# Altium footprint library HFPB_01-PCBLib.PcbLib: 102 footprints (part 3 of 7)
Each footprint in its own frame and in the unit in brackets; x right, y up, seen from the top. Pads: shape width x height; smd on the part's side, far side on the other; paste and mask are expansions set on the pad; w line width, h text height; cw(c..) or ccw(c..) is an arc to the next point about the centre after c.
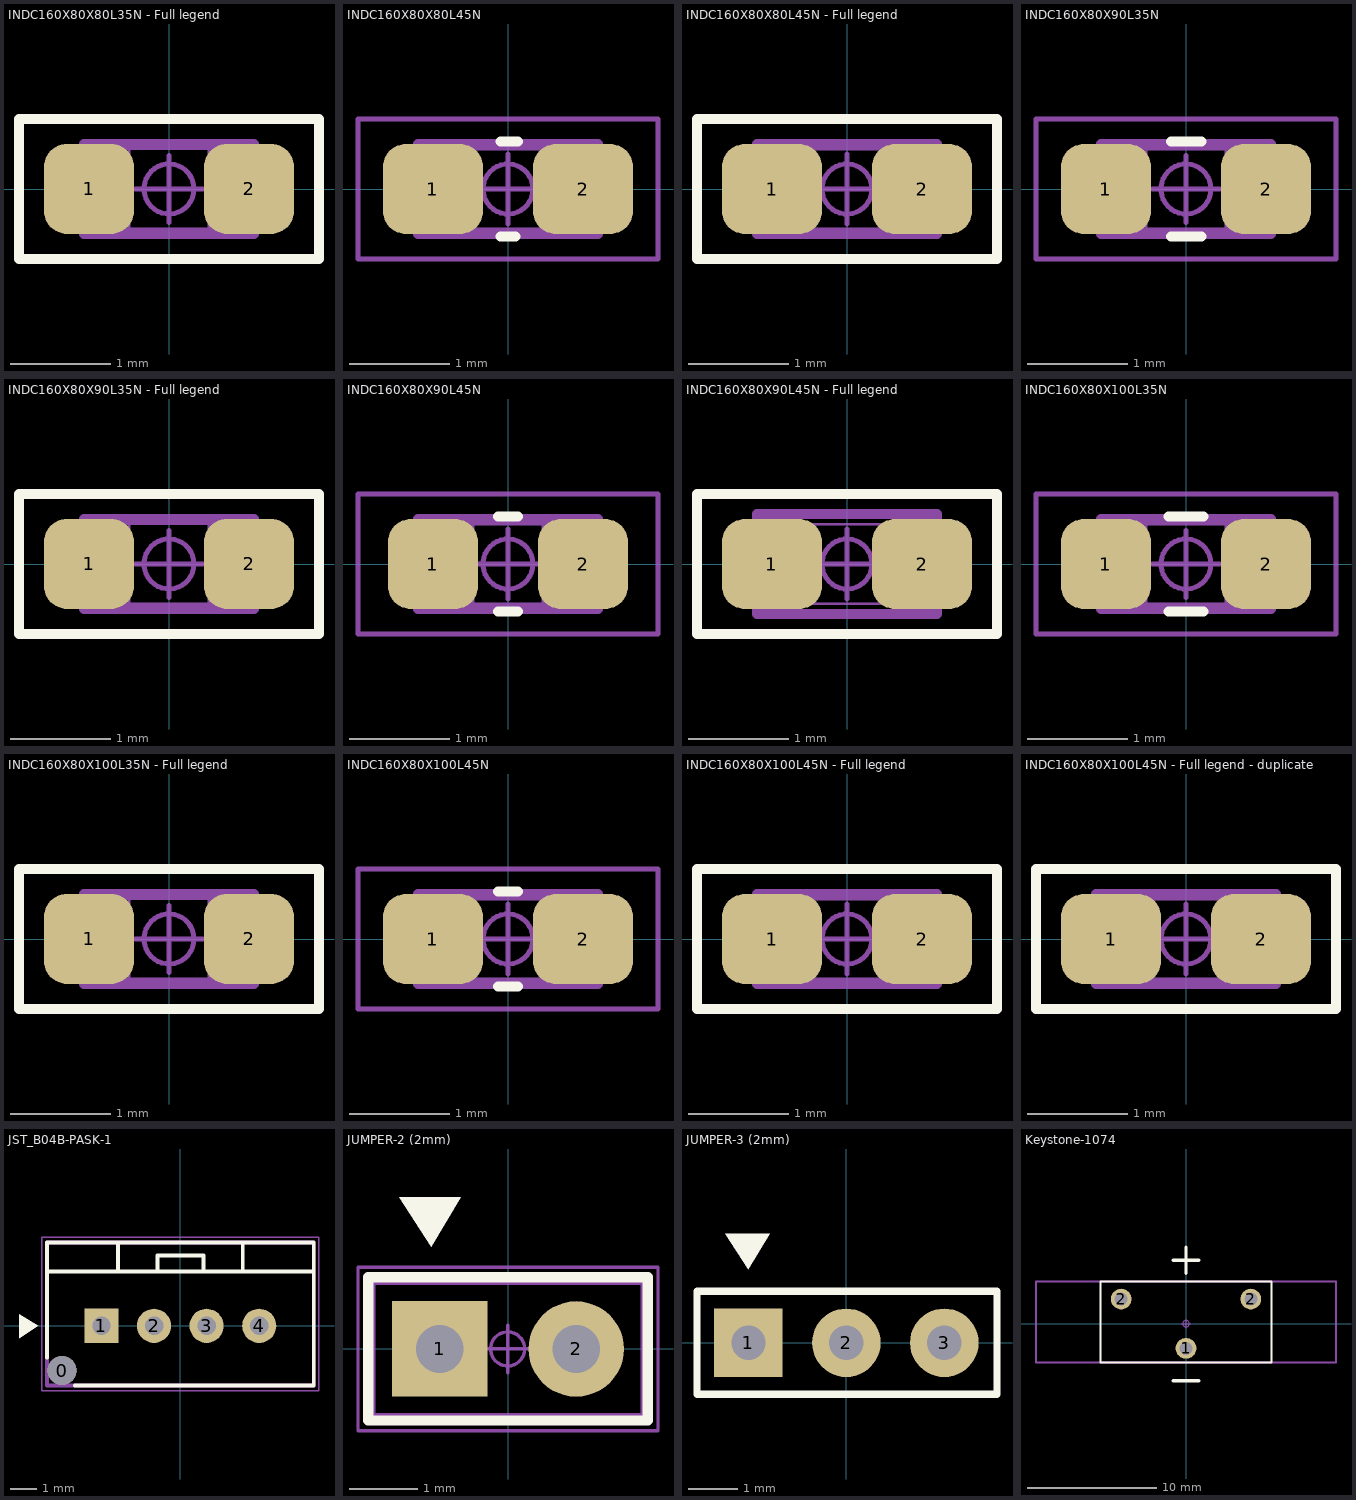
[diagram p2: the footprints below, top view; thin cyan lines are the x and y axes]

## INDC160X80X80L35N - Full legend [mm] "Inductor, Chip; 1.60 mm L X 0.80 mm W X 0.80 mm H body"
height 0.8
pads (2):
  rrect51% 0.9x0.9 smd: 1(-0.8,0.001) 2(0.8,0.001)
Top Overlay:
  lines w0.1: -1.5,-0.7 -1.5,0.7 1.5,0.7 1.5,-0.7 -1.5,-0.7
Mechanical 11:
  lines w0.1: -0.85,-0.449 0.85,-0.449 0.85,0.451 -0.85,0.451 -0.85,-0.449
Mechanical 12:
  lines w0.025: -0.8,-0.399 0.8,-0.399 ; -0.8,-0.399 -0.8,0.401 ; -0.8,-0.399 -0.8,0.401 ; -0.8,-0.399 -0.4,-0.399 -0.4,0.401 -0.8,0.401 ; -0.8,0.401 0.8,0.401 ; 0.8,-0.399 0.8,0.401 ; 0.8,-0.399 0.4,-0.399 0.4,0.401 0.8,0.401 ; 0.8,-0.399 0.8,0.401
Mechanical 15:
  circle w0.05: c0,0.001 r0.25
  lines w0.05: -0.335,0.001 0.335,0.001 ; 0,-0.334 0,0.336 ; -1.5,-0.699 1.5,-0.699 1.5,0.701 -1.5,0.701 -1.5,-0.699
Mechanical 16:
  text ".Designator" at -1.5,0.9 h1.2
3D body "INDC160X80X80L35.STEP": height 0.8, standoff 0, extent -0.8,-0.4 0.8,0.4

## INDC160X80X80L45N [mm] "Inductor, Chip; 1.60 mm L X 0.80 mm W X 0.80 mm H body"
height 0.8
pads (2):
  rrect51% 1x0.9 smd: 1(-0.75,0) 2(0.75,0)
Top Overlay:
  lines w0.1: -0.075,-0.475 0.075,-0.475 ; -0.075,0.475 0.1,0.475
Mechanical 11:
  lines w0.1: -0.9,-0.45 -0.9,0.45 0.9,0.45 0.9,-0.45 -0.9,-0.45
Mechanical 12:
  lines w0.025: -0.8,-0.4 -0.35,-0.4 -0.35,0.4 -0.8,0.4 ; -0.8,-0.4 -0.8,0.4 ; -0.8,-0.4 -0.8,0.4 ; -0.8,-0.4 0.8,-0.4 ; -0.8,0.4 0.8,0.4 ; 0.8,-0.4 0.8,0.4 ; 0.8,-0.4 0.35,-0.4 0.35,0.4 0.8,0.4 ; 0.8,-0.4 0.8,0.4
Mechanical 15:
  circle w0.05: c0,0 r0.25
  lines w0.05: -0.35,0 0.35,0 ; 0,-0.35 0,0.35 ; -1.5,-0.7 -1.5,0.7 1.5,0.7 1.5,-0.7 -1.5,-0.7
Mechanical 16:
  text ".Designator" at -1.5,1.025 h1.2
3D body "INDC160X80X80L45.STEP": height 0.8, standoff 0, extent -0.8,-0.4 0.8,0.4

## INDC160X80X80L45N - Full legend [mm] "Inductor, Chip; 1.60 mm L X 0.80 mm W X 0.80 mm H body"
height 0.8
pads (2):
  rrect51% 1x0.9 smd: 1(-0.75,0) 2(0.75,0)
Top Overlay:
  lines w0.1: -1.5,-0.7 -1.5,0.7 1.5,0.7 1.5,-0.7 -1.5,-0.7
Mechanical 11:
  lines w0.1: -0.9,-0.45 -0.9,0.45 0.9,0.45 0.9,-0.45 -0.9,-0.45
Mechanical 12:
  lines w0.025: -0.8,-0.4 -0.35,-0.4 -0.35,0.4 -0.8,0.4 ; -0.8,-0.4 -0.8,0.4 ; -0.8,-0.4 -0.8,0.4 ; -0.8,-0.4 0.8,-0.4 ; -0.8,0.4 0.8,0.4 ; 0.8,-0.4 0.8,0.4 ; 0.8,-0.4 0.35,-0.4 0.35,0.4 0.8,0.4 ; 0.8,-0.4 0.8,0.4
Mechanical 15:
  circle w0.05: c0,0 r0.25
  lines w0.05: -0.35,0 0.35,0 ; 0,-0.35 0,0.35 ; -1.5,-0.7 -1.5,0.7 1.5,0.7 1.5,-0.7 -1.5,-0.7
Mechanical 16:
  text ".Designator" at 0,0 h1.2
3D body "INDC160X80X80L45.STEP": height 0.8, standoff 0, extent -0.8,-0.4 0.8,0.4

## INDC160X80X90L35N [mm] "Inductor, Chip; 1.60 mm L X 0.80 mm W X 0.90 mm H body"
height 0.9
pads (2):
  rrect51% 0.9x0.9 smd: 1(-0.8,0.001) 2(0.8,0.001)
Top Overlay:
  lines w0.1: -0.15,-0.475 0.155,-0.475 ; -0.15,0.475 0.155,0.475
Mechanical 11:
  lines w0.1: -0.85,-0.449 -0.85,0.451 0.85,0.451 0.85,-0.449 -0.85,-0.449
Mechanical 12:
  lines w0.025: -0.8,-0.399 -0.4,-0.399 -0.4,0.401 -0.8,0.401 ; -0.8,-0.399 -0.8,0.401 ; -0.8,-0.399 -0.8,0.401 ; -0.8,-0.399 0.8,-0.399 ; -0.8,0.401 0.8,0.401 ; 0.8,-0.399 0.8,0.401 ; 0.8,-0.399 0.4,-0.399 0.4,0.401 0.8,0.401 ; 0.8,-0.399 0.8,0.401
Mechanical 15:
  circle w0.05: c0,0.001 r0.25
  lines w0.05: -0.335,0.001 0.335,0.001 ; 0,-0.334 0,0.336 ; -1.5,-0.699 -1.5,0.701 1.5,0.701 1.5,-0.699 -1.5,-0.699
Mechanical 16:
  text ".Designator" at -1.5,0.9 h1.2
3D body "INDC160X80X90L35.STEP": height 0.9, standoff 0, extent -0.8,-0.4 0.8,0.4

## INDC160X80X90L35N - Full legend [mm] "Inductor, Chip; 1.60 mm L X 0.80 mm W X 0.90 mm H body"
height 0.9
pads (2):
  rrect51% 0.9x0.9 smd: 1(-0.8,0.001) 2(0.8,0.001)
Top Overlay:
  lines w0.1: -1.5,-0.7 1.5,-0.7 1.5,0.7 -1.5,0.7 -1.5,-0.7
Mechanical 11:
  lines w0.1: -0.85,-0.449 -0.85,0.451 0.85,0.451 0.85,-0.449 -0.85,-0.449
Mechanical 12:
  lines w0.025: -0.8,-0.399 -0.4,-0.399 -0.4,0.401 -0.8,0.401 ; -0.8,-0.399 -0.8,0.401 ; -0.8,-0.399 -0.8,0.401 ; -0.8,-0.399 0.8,-0.399 ; -0.8,0.401 0.8,0.401 ; 0.8,-0.399 0.8,0.401 ; 0.8,-0.399 0.4,-0.399 0.4,0.401 0.8,0.401 ; 0.8,-0.399 0.8,0.401
Mechanical 15:
  circle w0.05: c0,0.001 r0.25
  lines w0.05: -0.335,0.001 0.335,0.001 ; 0,-0.334 0,0.336 ; -1.5,-0.699 -1.5,0.701 1.5,0.701 1.5,-0.699 -1.5,-0.699
Mechanical 16:
  text ".Designator" at -1.5,0.9 h1.2
3D body "INDC160X80X90L35.STEP": height 0.9, standoff 0, extent -0.8,-0.4 0.8,0.4

## INDC160X80X90L45N [mm] "Inductor, Chip; 1.60 mm L X 0.80 mm W X 0.90 mm H body"
height 0.9
pads (2):
  rrect51% 0.9x0.9 smd: 1(-0.75,0) 2(0.75,0)
Top Overlay:
  lines w0.1: -0.1,-0.475 0.1,-0.475 ; -0.1,0.475 0.1,0.475
Mechanical 11:
  lines w0.1: -0.9,-0.45 -0.9,0.45 0.9,0.45 0.9,-0.45 -0.9,-0.45
Mechanical 12:
  lines w0.025: -0.8,-0.4 -0.35,-0.4 -0.35,0.4 -0.8,0.4 ; -0.8,-0.4 -0.8,0.4 ; -0.8,-0.4 -0.8,0.4 ; -0.8,-0.4 0.8,-0.4 ; -0.8,0.4 0.8,0.4 ; 0.8,-0.4 0.8,0.4 ; 0.8,-0.4 0.35,-0.4 0.35,0.4 0.8,0.4 ; 0.8,-0.4 0.8,0.4
Mechanical 15:
  circle w0.05: c0,0 r0.25
  lines w0.05: -0.35,0 0.35,0 ; 0,-0.35 0,0.35 ; -1.5,-0.7 -1.5,0.7 1.5,0.7 1.5,-0.7 -1.5,-0.7
Mechanical 16:
  text ".Designator" at -1.1,1 h1.2
3D body "INDC160X80X90L45.STEP": height 0.9, standoff 0, extent -0.8,-0.4 0.8,0.4

## INDC160X80X90L45N - Full legend [mm] "Inductor, Chip; 1.60 mm L X 0.80 mm W X 0.90 mm H body"
height 0.9
pads (2):
  rrect51% 1x0.9 smd: 1(-0.75,0) 2(0.75,0)
Top Overlay:
  lines w0.1: -1.5,-0.7 1.5,-0.7 1.5,0.7 -1.5,0.7 -1.5,-0.7
Mechanical 11:
  lines w0.1: -0.9,-0.5 0.9,-0.5 0.9,0.5 -0.9,0.5 -0.9,-0.5
Mechanical 12:
  lines w0.025: -0.8,-0.4 0.8,-0.4 ; -0.8,-0.4 -0.8,0.4 ; -0.8,-0.4 -0.8,0.4 ; -0.8,-0.4 -0.35,-0.4 -0.35,0.4 -0.8,0.4 ; -0.8,0.4 0.8,0.4 ; 0.8,-0.4 0.8,0.4 ; 0.8,-0.4 0.35,-0.4 0.35,0.4 0.8,0.4 ; 0.8,-0.4 0.8,0.4
Mechanical 15:
  circle w0.05: c0,0 r0.25
  lines w0.05: -0.35,0 0.35,0 ; 0,-0.35 0,0.35 ; -1.5,-0.7 1.5,-0.7 1.5,0.7 -1.5,0.7 -1.5,-0.7
Mechanical 16:
  text ".Designator" at 0,0 h1.2
3D body "INDC160X80X90L45.STEP": height 0.9, standoff 0, extent -0.8,-0.4 0.8,0.4

## INDC160X80X100L35N [mm] "Inductor, Chip; 1.60 mm L X 0.80 mm W X 1.00 mm H body"
height 1
pads (2):
  rrect51% 0.9x0.9 smd: 1(-0.8,0.001) 2(0.8,0.001)
Top Overlay:
  lines w0.1: -0.175,-0.475 0.175,-0.475 ; -0.175,0.475 0.175,0.475
Mechanical 11:
  lines w0.1: -0.85,-0.449 0.85,-0.449 0.85,0.451 -0.85,0.451 -0.85,-0.449
Mechanical 12:
  lines w0.025: -0.8,-0.399 0.8,-0.399 ; -0.8,-0.399 -0.8,0.401 ; -0.8,-0.399 -0.8,0.401 ; -0.8,-0.399 -0.4,-0.399 -0.4,0.401 -0.8,0.401 ; -0.8,0.401 0.8,0.401 ; 0.8,-0.399 0.8,0.401 ; 0.8,-0.399 0.4,-0.399 0.4,0.401 0.8,0.401 ; 0.8,-0.399 0.8,0.401
Mechanical 15:
  circle w0.05: c0,0.001 r0.25
  lines w0.05: -0.335,0.001 0.335,0.001 ; 0,-0.334 0,0.336 ; -1.5,-0.699 1.5,-0.699 1.5,0.701 -1.5,0.701 -1.5,-0.699
Mechanical 16:
  text ".Designator" at -1.5,0.9 h1.2
3D body "INDC160X80X100L35.STEP": height 1, standoff 0, extent -0.8,-0.4 0.8,0.4

## INDC160X80X100L35N - Full legend [mm] "Inductor, Chip; 1.60 mm L X 0.80 mm W X 1.00 mm H body"
height 1
pads (2):
  rrect51% 0.9x0.9 smd: 1(-0.8,0.001) 2(0.8,0.001)
Top Overlay:
  lines w0.1: -1.5,-0.7 -1.5,0.7 1.5,0.7 1.5,-0.7 -1.5,-0.7
Mechanical 11:
  lines w0.1: -0.85,-0.449 0.85,-0.449 0.85,0.451 -0.85,0.451 -0.85,-0.449
Mechanical 12:
  lines w0.025: -0.8,-0.399 0.8,-0.399 ; -0.8,-0.399 -0.8,0.401 ; -0.8,-0.399 -0.8,0.401 ; -0.8,-0.399 -0.4,-0.399 -0.4,0.401 -0.8,0.401 ; -0.8,0.401 0.8,0.401 ; 0.8,-0.399 0.8,0.401 ; 0.8,-0.399 0.4,-0.399 0.4,0.401 0.8,0.401 ; 0.8,-0.399 0.8,0.401
Mechanical 15:
  circle w0.05: c0,0.001 r0.25
  lines w0.05: -0.335,0.001 0.335,0.001 ; 0,-0.334 0,0.336 ; -1.5,-0.699 1.5,-0.699 1.5,0.701 -1.5,0.701 -1.5,-0.699
Mechanical 16:
  text ".Designator" at -1.5,0.9 h1.2
3D body "INDC160X80X100L35.STEP": height 1, standoff 0, extent -0.8,-0.4 0.8,0.4

## INDC160X80X100L45N [mm] "Inductor, Chip; 1.60 mm L X 0.80 mm W X 1.0 mm H body"
height 1
pads (2):
  rrect51% 1x0.9 smd: 1(-0.75,0) 2(0.75,0)
Top Overlay:
  lines w0.1: -0.1,-0.475 0.1,-0.475 ; -0.1,0.475 0.1,0.475
Mechanical 11:
  lines w0.1: -0.9,-0.45 0.9,-0.45 0.9,0.45 -0.9,0.45 -0.9,-0.45
Mechanical 12:
  lines w0.025: -0.8,-0.4 0.8,-0.4 ; -0.8,-0.4 -0.8,0.4 ; -0.8,-0.4 -0.8,0.4 ; -0.8,-0.4 -0.35,-0.4 -0.35,0.4 -0.8,0.4 ; -0.8,0.4 0.8,0.4 ; 0.8,-0.4 0.8,0.4 ; 0.8,-0.4 0.35,-0.4 0.35,0.4 0.8,0.4 ; 0.8,-0.4 0.8,0.4
Mechanical 15:
  circle w0.05: c0,0 r0.25
  lines w0.05: -0.35,0 0.35,0 ; 0,-0.35 0,0.35 ; -1.5,-0.7 1.5,-0.7 1.5,0.7 -1.5,0.7 -1.5,-0.7
Mechanical 16:
  text ".Designator" at 0,0 h1.2
3D body "INDC160X80X100L45.STEP": height 1, standoff 0, extent -0.8,-0.4 0.8,0.4

## INDC160X80X100L45N - Full legend [mm] "Inductor, Chip; 1.60 mm L X 0.80 mm W X 1.0 mm H body"
height 1
pads (2):
  rrect51% 1x0.9 smd: 1(-0.75,0) 2(0.75,0)
Top Overlay:
  lines w0.1: -1.5,-0.7 1.5,-0.7 1.5,0.7 -1.5,0.7 -1.5,-0.7
Mechanical 11:
  lines w0.1: -0.9,-0.45 -0.9,0.45 0.9,0.45 0.9,-0.45 -0.9,-0.45
Mechanical 12:
  lines w0.025: -0.8,-0.4 -0.35,-0.4 -0.35,0.4 -0.8,0.4 ; -0.8,-0.4 -0.8,0.4 ; -0.8,-0.4 -0.8,0.4 ; -0.8,-0.4 0.8,-0.4 ; -0.8,0.4 0.8,0.4 ; 0.8,-0.4 0.8,0.4 ; 0.8,-0.4 0.35,-0.4 0.35,0.4 0.8,0.4 ; 0.8,-0.4 0.8,0.4
Mechanical 15:
  circle w0.05: c0,0 r0.25
  lines w0.05: -0.35,0 0.35,0 ; 0,-0.35 0,0.35 ; -1.5,-0.7 -1.5,0.7 1.5,0.7 1.5,-0.7 -1.5,-0.7
Mechanical 16:
  text ".Designator" at 0,0 h1.2
3D body "INDC160X80X100L45.STEP": height 1, standoff 0, extent -0.8,-0.4 0.8,0.4

## INDC160X80X100L45N - Full legend - duplicate [mm] "Inductor, Chip; 1.60 mm L X 0.80 mm W X 1.0 mm H body"
height 1
pads (2):
  rrect51% 1x0.9 smd: 1(-0.75,0) 2(0.75,0)
Top Overlay:
  lines w0.1: -1.5,-0.7 -1.5,0.7 1.5,0.7 1.5,-0.7 -1.5,-0.7
Mechanical 11:
  lines w0.1: -0.9,-0.45 0.9,-0.45 0.9,0.45 -0.9,0.45 -0.9,-0.45
Mechanical 12:
  lines w0.025: -0.8,-0.4 0.8,-0.4 ; -0.8,-0.4 -0.8,0.4 ; -0.8,-0.4 -0.8,0.4 ; -0.8,-0.4 -0.35,-0.4 -0.35,0.4 -0.8,0.4 ; -0.8,0.4 0.8,0.4 ; 0.8,-0.4 0.8,0.4 ; 0.8,-0.4 0.35,-0.4 0.35,0.4 0.8,0.4 ; 0.8,-0.4 0.8,0.4
Mechanical 15:
  circle w0.05: c0,0 r0.25
  lines w0.05: -0.35,0 0.35,0 ; 0,-0.35 0,0.35 ; -1.5,-0.7 1.5,-0.7 1.5,0.7 -1.5,0.7 -1.5,-0.7
Mechanical 16:
  text ".Designator" at 0,0 h1.2
3D body "INDC160X80X100L45.STEP": height 1, standoff 0, extent -0.8,-0.4 0.8,0.4

## JST_B04B-PASK-1 [mm]
pads (5):
  round 1.1 hole 1.1 unplated mask-1: 0(-4.5,-1.7)
  rect 1.3x1.3 hole 0.7: 1(-3,0)
  round 1.3 hole 0.7: 2(-1,0) 3(1,0) 4(3,0)
Top Overlay:
  region: -6.138,0.442 -6.138,-0.464 -5.412,0.008
  region: -6.138,0.442 -6.138,-0.464 -5.412,0.008
  lines w0.15: -5.075,-1.2 -5.075,3.175 5.075,3.175 5.075,-2.275 -4,-2.275 ; -5.075,2.075 5.075,2.075 ; -2.375,2.075 -2.375,3.175 ; -0.875,2.075 -0.875,2.675 0.875,2.675 0.875,2.075 ; 2.375,2.075 2.375,3.175
Mechanical 13:
  lines w0.15: -5.075,-2.275 -5.075,3.175 5.075,3.175 5.075,-2.275 -5.075,-2.275
Mechanical 15:
  lines w0.05: -5.275,-2.475 -5.275,3.375 5.275,3.375 5.275,-2.475 -5.275,-2.475
3D body "B04B-PASK-1++.stp": height 7.75, standoff -2.95, extent -5,-2.2 5,3.1

## JUMPER-2 (2mm) [mm] "Header, Vertical, 2.0 mm pitch; 0.5 mm lead width, 2 pins, 1 row, 2 pins per row, 4.0 mm L X 2.0 mm W X 6.90 mm H body"
height 6.9
pads (2):
  rect 1.4x1.4 hole 0.7 paste-1.6: 1(-1,0)
  round 1.4 hole 0.7 paste-1.6: 2(1,0)
Top Overlay:
  region: -0.69,2.225 -1.596,2.225 -1.125,1.5
  lines w0.15: -2.05,-1.05 2.05,-1.05 2.05,1.05 -2.05,1.05 -2.05,-1.05
Mechanical 11:
  lines w0.12: -2,-1 2,-1 2,1 -2,1 -2,-1
Mechanical 12:
  lines w0.025: -2,-1 2.002,-1 2.002,1 -2,1 -2,-1 ; -1.315,-0.32 -0.675,-0.32 -0.675,0.32 -1.315,0.32 -1.315,-0.32 ; 0.68,-0.32 1.32,-0.32 1.32,0.32 0.68,0.32 0.68,-0.32
Mechanical 15:
  circle w0.05: c-0.005,0 r0.25
  lines w0.05: -0.355,0 0.345,0 ; -0.005,-0.35 -0.005,0.35 ; -2.2,-1.2 2.2,-1.2 2.2,1.2 -2.2,1.2 -2.2,-1.2
Mechanical 16:
  text ".Designator" at -1.15,1.45 h1.2
3D body "951102-8622-AR.STEP": height 6.1, standoff -2.65, extent -2.002,-1 2.002,1.004

## JUMPER-3 (2mm) [mm] "Header, Vertical, 2.0 mm pitch; 0.5 mm lead width, 3 pins, 1 row, 3 pins per row, 6.0 mm L X 2.0 mm W X 6.90 mm H body"
height 6.9
pads (3):
  rect 1.4x1.4 hole 0.7 paste-1.6: 1(-2,0)
  round 1.4 hole 0.7 paste-1.6: 2(0,0) 3(2,0)
Top Overlay:
  region: -1.565,2.225 -2.471,2.225 -2,1.5
  lines w0.15: -3.05,-1.05 -3.05,1.05 3.075,1.05 3.075,-1.05 -3.05,-1.05
Mechanical 11:
  lines w0.12: -3.05,-1.05 -3.05,1.05 3.075,1.05 3.075,-1.05 -3.05,-1.05
Mechanical 12:
  lines w0.025: -3.05,-1.05 -3.05,1.05 3.075,1.05 3.075,-1.05 -3.05,-1.05 ; -2.31,-0.325 -2.31,0.315 -1.67,0.315 -1.67,-0.325 -2.31,-0.325 ; -0.32,-0.32 -0.32,0.32 0.32,0.32 0.32,-0.32 -0.32,-0.32 ; 1.67,-0.325 1.67,0.315 2.31,0.315 2.31,-0.325 1.67,-0.325
Mechanical 15:
  circle w0.05: c0,0 r0.25
  lines w0.05: -0.35,0 0.35,0 ; 0,-0.35 0,0.35 ; -3.05,-1.05 -3.05,1.05 3.075,1.05 3.075,-1.05 -3.05,-1.05
Mechanical 16:
  text ".Designator" at -2.54,0 h1.2
3D body "951103-8622-AR.STEP": height 6.1, standoff -2.65, extent -3,-1.004 3.004,1

## Keystone-1074 [mm] "Battery holder"
height 25
pads (3):
  round 1.6 hole 1: 1(0,-1.9) 2(-5,1.9) 2(5,1.9)
Top Overlay:
  lines w0.15: -6.6,-3 6.6,-3 6.6,3.25 -6.6,3.25 -6.6,-3
  lines w0.25: -1,-4.4 1,-4.4 ; -1,4.9 1,4.9 ; 0,3.9 0,5.9
Mechanical 12:
  lines w0.025: -5.28,1.75 -5.28,2.05 -4.72,2.05 -4.72,1.75 -5.28,1.75
Mechanical 15:
  circle w0.05: c0,0 r0.25
  lines w0.05: -0.35,0 0.35,0 ; 0,-0.35 0,0.35
  lines w0.15: -11.575,-3 -11.575,3.25 11.575,3.25 11.575,-3 -11.575,-3
Mechanical 16:
  text ".Designator" at -5.8,3.2 h1.2
3D body "keystone-PN1074.STEP": height 18.38, standoff -3.02, extent -11.497,-2.925 11.497,3.175